# Altium schematic symbol library L08R5000Q1.SCHLIB: 1 symbol
Pins are listed as number, name and electrical type; pins without a type are passive.

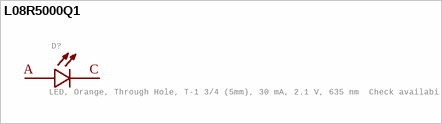
[diagram p0: symbol L08R5000Q1]

## L08R5000Q1
designator D?, comment LED, Orange, Through Hole, T-1 3/4 (5mm), 30 mA, 2.1 V, 635 nm  Check availability
GateName_1: G$1; SymbolName_1: L08R5000Q1; MF: LED Technology; Description: LED, 5MM, ORANGE; LED / Lamp Size: 5mm / T-1 3/4; LED Colour: Orange; Typ Luminous Intensity: 4.3mcd; Viewing Angle: ...; LibraryName: L08R5000Q1; DeviceSetName: L08R5000Q1; Package: LEDRD254W57D500H1070; Package: None; Price: None; MP: L08R5000Q1; Availability: In Stock
footprint LEDRD254W57D500H1070
pins: A, C